# Altium footprint library WR-WTB_2.00mm.PcbLib: 70 footprints (part 4 of 5)
Each footprint in its own frame and in the unit in brackets; x right, y up, seen from the top. Pads: shape width x height; smd on the part's side, far side on the other; paste and mask are expansions set on the pad; w line width, h text height; cw(c..) or ccw(c..) is an arc to the next point about the centre after c.
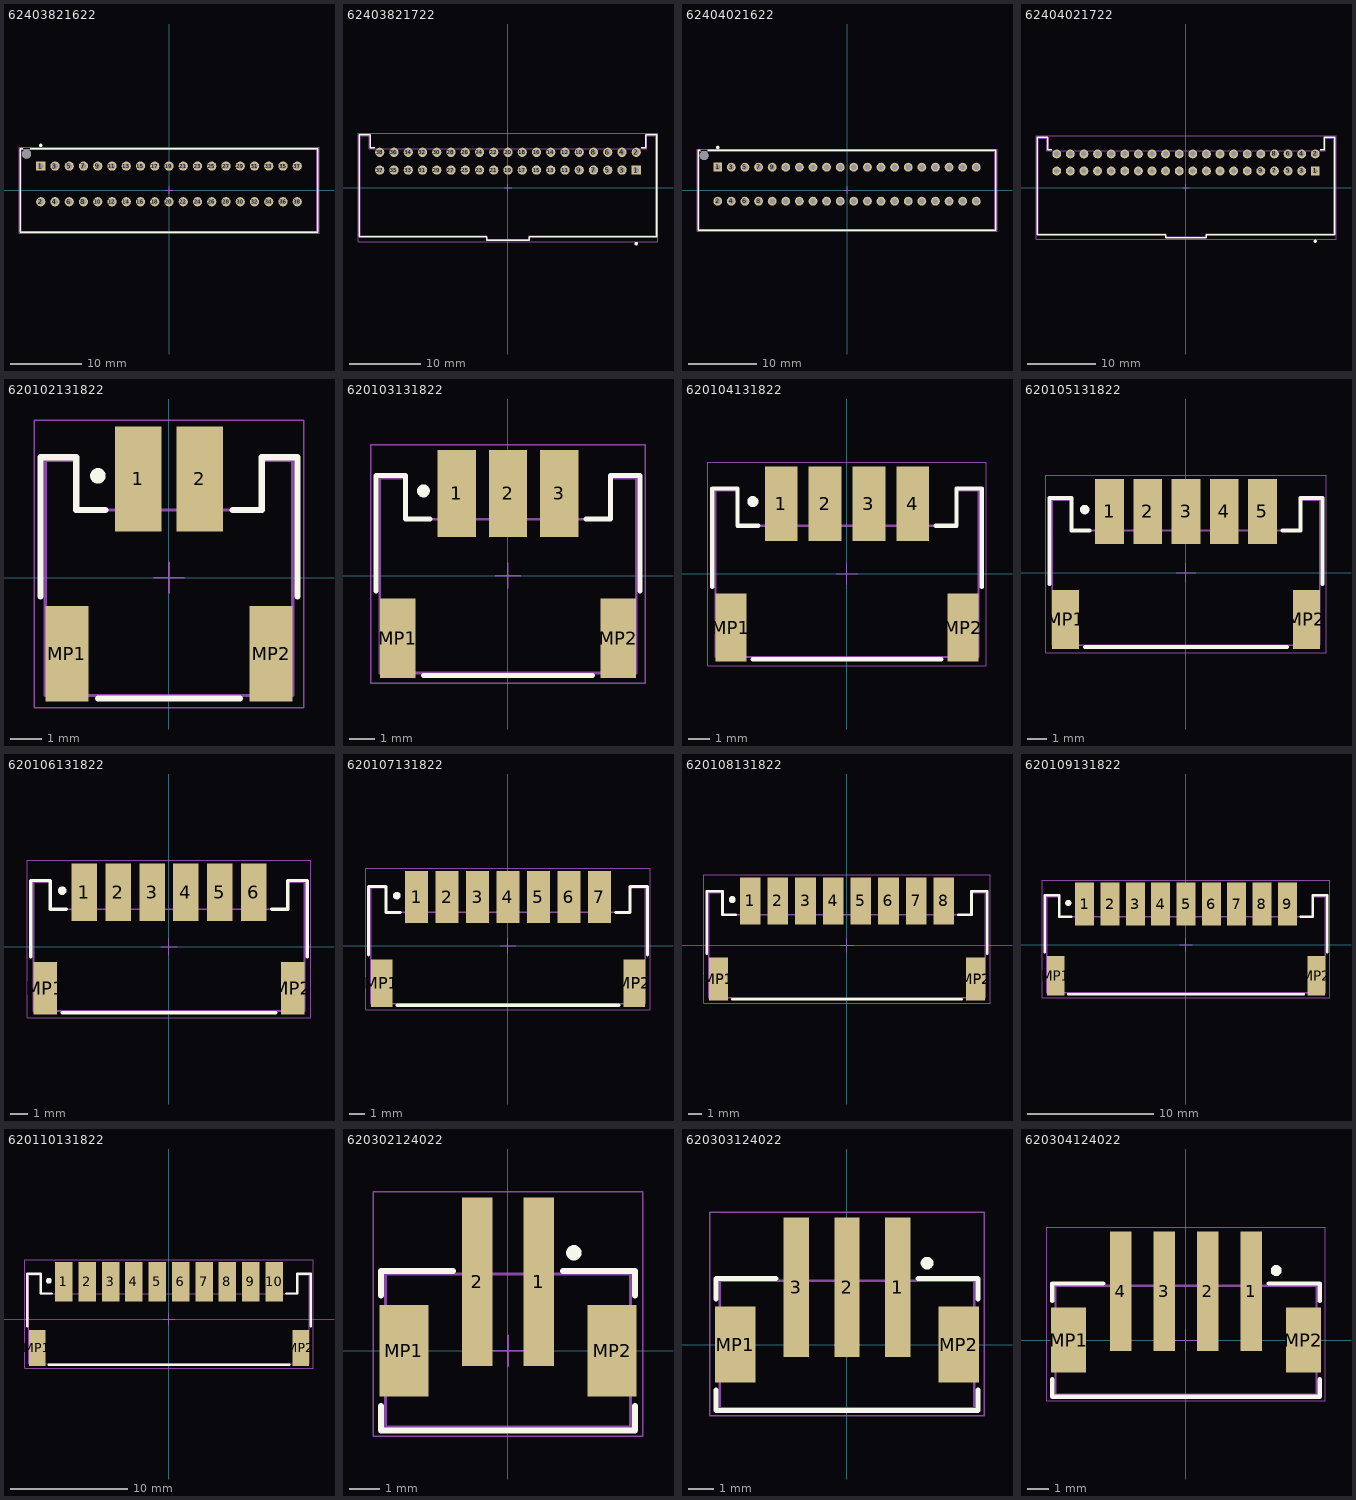
[diagram p3: the footprints below, top view; thin cyan lines are the x and y axes]

## 62403821622 [mm] "2.00mm Male Dual Row Vertical Shrouded Header with positive locking, 38p"
height 11.6
pads (39):
  rect 1.3x1.3 hole 0.8: 1(-18,3.4)
  round 1.3 hole 0.8: 2(-18,-1.6) 3(-16,3.4) 4(-16,-1.6) 5(-14,3.4) 6(-14,-1.6) 7(-12,3.4) 8(-12,-1.6) 9(-10,3.4) 10(-10,-1.6) 11(-8,3.4) 12(-8,-1.6) 13(-6,3.4) 14(-6,-1.6) 15(-4,3.4) 16(-4,-1.6) 17(-2,3.4) 18(-2,-1.6) 19(0,3.4) 20(0,-1.6) 21(2,3.4) 22(2,-1.6) 23(4,3.4) 24(4,-1.6) 25(6,3.4) 26(6,-1.6) 27(8,3.4) 28(8,-1.6) 29(10,3.4) 30(10,-1.6) 31(12,3.4) 32(12,-1.6) 33(14,3.4) 34(14,-1.6) 35(16,3.4) 36(16,-1.6) 37(18,3.4) 38(18,-1.6)
  round 1.3 hole 1.3 unplated: MH1(-20,5.1)
Top Overlay:
  circle w0.25: c-18,6.3 r0.125
  lines w0.2: -20.55,5.85 -20.85,5.85 -20.85,-5.85 20.85,-5.85 20.85,5.85 -19.45,5.85
Mechanical 13:
  lines w0.1: -20.7,-5.75 -20.7,5.75 ; -20.7,-5.75 20.7,-5.75 20.7,5.75 -20.7,5.75 ; -20.7,-5.75 -20.7,5.75
Mechanical 15:
  lines w0.05: -0.5,0 0.5,0 ; 0,-0.5 0,0.5 ; -21.05,-6.05 21.05,-6.05 21.05,6.05 -21.05,6.05 -21.05,-6.05
3D body "62403821622.stp": height 9.78, standoff -3.17, extent -20.7,-5.75 20.7,5.75

## 62403821722 [mm] "2.00mm Male Dual Row Horizontal Shrouded Header with positive locking, 38p"
height 11.7
pads (38):
  rect 1.3x1.3 hole 0.8: 1(18,2.45)
  round 1.3 hole 0.8: 2(18,4.95) 3(16,2.45) 4(16,4.95) 5(14,2.45) 6(14,4.95) 7(12,2.45) 8(12,4.95) 9(10,2.45) 10(10,4.95) 11(8,2.45) 12(8,4.95) 13(6,2.45) 14(6,4.95) 15(4,2.45) 16(4,4.95) 17(2,2.45) 18(2,4.95) 19(0,2.45) 20(0,4.95) 21(-2,2.45) 22(-2,4.95) 23(-4,2.45) 24(-4,4.95) 25(-6,2.45) 26(-6,4.95) 27(-8,2.45) 28(-8,4.95) 29(-10,2.45) 30(-10,4.95) 31(-12,2.45) 32(-12,4.95) 33(-14,2.45) 34(-14,4.95) 35(-16,2.45) 36(-16,4.95) 37(-18,2.45) 38(-18,4.95)
Top Overlay:
  circle w0.25: c18,-7.875 r0.125
  lines w0.2: -18.7,5.6 -19.35,5.6 -19.35,7.4 -20.85,7.4 -20.85,-6.9 -3,-6.9 -3,-7.4 3,-7.4 3,-6.9 20.85,-6.9 20.85,7.4 19.35,7.4 19.35,5.6 18.7,5.6
Mechanical 13:
  lines w0.1: -20.7,-6.75 -3,-6.75 -3,-7.25 3,-7.25 3,-6.75 20.7,-6.75 20.7,7.25 19.5,7.25 19.5,5.45 -19.5,5.45 -19.5,7.25 -20.7,7.25 -20.7,-6.75
Mechanical 15:
  lines w0.05: -0.5,0 0.5,0 ; 0,-0.5 0,0.5 ; -21.05,-7.6 21.05,-7.6 21.05,7.6 -21.05,7.6 -21.05,-7.6
3D body "62403821722.stp": height 11.73, standoff -3.17, extent -20.7,-7.25 20.7,7.25

## 62404021622 [mm] "2.00mm Male Dual Row Vertical Shrouded Header with positive locking, 40p"
height 11.6
pads (41):
  rect 1.3x1.3 hole 0.8: 1(-19,3.4)
  round 1.3 hole 0.8: 2(-19,-1.6) 3(-17,3.4) 4(-17,-1.6) 5(-15,3.4) 6(-15,-1.6) 7(-13,3.4) 8(-13,-1.6) 9(-11,3.4) 10(-11,-1.6) 11(-9,3.4) 12(-9,-1.6) 13(-7,3.4) 14(-7,-1.6) 15(-5,3.4) 16(-5,-1.6) 17(-3,3.4) 18(-3,-1.6) 19(-1,3.4) 20(-1,-1.6) 21(1,3.4) 22(1,-1.6) 23(3,3.4) 24(3,-1.6) 25(5,3.4) 26(5,-1.6) 27(7,3.4) 28(7,-1.6) 29(9,3.4) 30(9,-1.6) 31(11,3.4) 32(11,-1.6) 33(13,3.4) 34(13,-1.6) 35(15,3.4) 36(15,-1.6) 37(17,3.4) 38(17,-1.6) 39(19,3.4) 40(19,-1.6)
  round 1.3 hole 1.3 unplated: MH1(-21,5.1)
Top Overlay:
  circle w0.25: c-19,6.3 r0.125
  lines w0.2: -21.55,5.85 -21.85,5.85 -21.85,-5.85 21.85,-5.85 21.85,5.85 -20.45,5.85
Mechanical 13:
  lines w0.1: -21.7,-5.75 -21.7,5.75 ; -21.7,-5.75 21.7,-5.75 21.7,5.75 -21.7,5.75 ; -21.7,-5.75 -21.7,5.75
Mechanical 15:
  lines w0.05: -0.5,0 0.5,0 ; 0,-0.5 0,0.5 ; -22.05,-6.05 22.05,-6.05 22.05,6.05 -22.05,6.05 -22.05,-6.05
3D body "62404021622.stp": height 9.78, standoff -3.17, extent -21.7,-5.75 21.7,5.75

## 62404021722 [mm] "2.00mm Male Dual Row Horizontal Shrouded Header with positive locking, 40p"
height 11.7
pads (40):
  rect 1.3x1.3 hole 0.8: 1(19,2.45)
  round 1.3 hole 0.8: 2(19,4.95) 3(17,2.45) 4(17,4.95) 5(15,2.45) 6(15,4.95) 7(13,2.45) 8(13,4.95) 9(11,2.45) 10(11,4.95) 11(9,2.45) 12(9,4.95) 13(7,2.45) 14(7,4.95) 15(5,2.45) 16(5,4.95) 17(3,2.45) 18(3,4.95) 19(1,2.45) 20(1,4.95) 21(-1,2.45) 22(-1,4.95) 23(-3,2.45) 24(-3,4.95) 25(-5,2.45) 26(-5,4.95) 27(-7,2.45) 28(-7,4.95) 29(-9,2.45) 30(-9,4.95) 31(-11,2.45) 32(-11,4.95) 33(-13,2.45) 34(-13,4.95) 35(-15,2.45) 36(-15,4.95) 37(-17,2.45) 38(-17,4.95) 39(-19,2.45) 40(-19,4.95)
Top Overlay:
  circle w0.25: c19,-7.875 r0.125
  lines w0.2: -19.7,5.6 -20.35,5.6 -20.35,7.4 -21.85,7.4 -21.85,-6.9 -3,-6.9 -3,-7.4 3,-7.4 3,-6.9 21.85,-6.9 21.85,7.4 20.35,7.4 20.35,5.6 19.7,5.6
Mechanical 13:
  lines w0.1: -21.7,-6.75 -21.7,7.25 -20.5,7.25 -20.5,5.45 20.5,5.45 20.5,7.25 21.7,7.25 21.7,-6.75 3,-6.75 3,-7.25 -3,-7.25 -3,-6.75 -21.7,-6.75
Mechanical 15:
  lines w0.05: -0.5,0 0.5,0 ; 0,-0.5 0,0.5 ; -22.05,-7.6 -22.05,7.6 22.05,7.6 22.05,-7.6 -22.05,-7.6
3D body "62404021722.stp": height 11.73, standoff -3.17, extent -21.7,-7.25 21.7,7.25

## 620102131822 [mm] "2.00mm SMT Male Horizontal Shrouded Header, 2p"
height 5.6
pads (4):
  rect 1.5x3.4 smd: 1(-1,3.2) 2(1,3.2)
  rect 1.4x3.1 smd: MP1(-3.3,-2.45) MP2(3.3,-2.45)
Top Overlay:
  circle w0.25: c-2.3,3.3 r0.125
  lines w0.2: -4.15,-0.6 -4.15,3.9 -3,3.9 -3,2.2 -2.05,2.2 ; -2.3,-3.9 2.3,-3.9 ; 2.05,2.2 3,2.2 3,3.9 4.15,3.9 4.15,-0.6
Mechanical 13:
  lines w0.1: -4,-3.8 -4,3.8 -3,3.8 -3,2.2 3,2.2 3,3.8 4,3.8 4,-3.8 -4,-3.8
Mechanical 15:
  lines w0.05: -0.5,0 0.5,0 ; 0,-0.5 0,0.5 ; -4.35,-4.2 -4.35,5.1 4.35,5.1 4.35,-4.2 -4.35,-4.2
3D body "620102131822.stp": height 5.57, standoff -0.01, extent -4,-3.8 4,4.8

## 620103131822 [mm] "2.00mm SMT Male Horizontal Shrouded Header, 3p"
height 5.6
pads (5):
  rect 1.5x3.4 smd: 1(-2,3.2) 2(0,3.2) 3(2,3.2)
  rect 1.4x3.1 smd: MP1(-4.3,-2.45) MP2(4.3,-2.45)
Top Overlay:
  circle w0.25: c-3.3,3.3 r0.125
  lines w0.2: -5.15,-0.6 -5.15,3.9 -4,3.9 -4,2.2 -3.05,2.2 ; -3.3,-3.9 3.3,-3.9 ; 3.05,2.2 4,2.2 4,3.9 5.15,3.9 5.15,-0.6
Mechanical 13:
  lines w0.1: -5,-3.8 -5,3.8 -4,3.8 -4,2.2 4,2.2 4,3.8 5,3.8 5,-3.8 -5,-3.8
Mechanical 15:
  lines w0.05: -0.5,0 0.5,0 ; 0,-0.5 0,0.5 ; -5.35,-4.2 -5.35,5.1 5.35,5.1 5.35,-4.2 -5.35,-4.2
3D body "620103131822.stp": height 5.57, standoff -0.01, extent -5,-3.8 5,4.8

## 620104131822 [mm] "2.00mm SMT Male Horizontal Shrouded Header, 4p"
height 5.6
pads (6):
  rect 1.5x3.4 smd: 1(-3,3.2) 2(-1,3.2) 3(1,3.2) 4(3,3.2)
  rect 1.4x3.1 smd: MP1(-5.3,-2.45) MP2(5.3,-2.45)
Top Overlay:
  circle w0.25: c-4.3,3.3 r0.125
  lines w0.2: -6.15,-0.6 -6.15,3.9 -5,3.9 -5,2.2 -4.05,2.2 ; -4.3,-3.9 4.3,-3.9 ; 4.05,2.2 5,2.2 5,3.9 6.15,3.9 6.15,-0.6
Mechanical 13:
  lines w0.1: -6,-3.8 6,-3.8 6,3.8 5,3.8 5,2.2 -5,2.2 -5,3.8 -6,3.8 -6,-3.8
Mechanical 15:
  lines w0.05: -0.5,0 0.5,0 ; 0,-0.5 0,0.5 ; -6.35,-4.2 6.35,-4.2 6.35,5.1 -6.35,5.1 -6.35,-4.2
3D body "620104131822.stp": height 5.57, standoff -0.01, extent -6,-3.8 6,4.8

## 620105131822 [mm] "2.00mm SMT Male Horizontal Shrouded Header, 5p"
height 5.6
pads (7):
  rect 1.5x3.4 smd: 1(-4,3.2) 2(-2,3.2) 3(0,3.2) 4(2,3.2) 5(4,3.2)
  rect 1.4x3.1 smd: MP1(-6.3,-2.45) MP2(6.3,-2.45)
Top Overlay:
  circle w0.25: c-5.3,3.3 r0.125
  lines w0.2: -7.15,-0.6 -7.15,3.9 -6,3.9 -6,2.2 -5.05,2.2 ; -5.3,-3.9 5.3,-3.9 ; 5.05,2.2 6,2.2 6,3.9 7.15,3.9 7.15,-0.6
Mechanical 13:
  lines w0.1: -7,-3.8 7,-3.8 7,3.8 6,3.8 6,2.2 -6,2.2 -6,3.8 -7,3.8 -7,-3.8
Mechanical 15:
  lines w0.05: -0.5,0 0.5,0 ; 0,-0.5 0,0.5 ; -7.35,-4.2 7.35,-4.2 7.35,5.1 -7.35,5.1 -7.35,-4.2
3D body "620105131822.stp": height 5.57, standoff -0.01, extent -7,-3.8 7,4.8

## 620106131822 [mm] "2.00mm SMT Male Horizontal Shrouded Header, 6p"
height 5.6
pads (8):
  rect 1.5x3.4 smd: 1(-5,3.2) 2(-3,3.2) 3(-1,3.2) 4(1,3.2) 5(3,3.2) 6(5,3.2)
  rect 1.4x3.1 smd: MP1(-7.3,-2.45) MP2(7.3,-2.45)
Top Overlay:
  circle w0.25: c-6.3,3.3 r0.125
  lines w0.2: -8.15,-0.6 -8.15,3.9 -7,3.9 -7,2.2 -6.05,2.2 ; -6.3,-3.9 6.3,-3.9 ; 6.05,2.2 7,2.2 7,3.9 8.15,3.9 8.15,-0.6
Mechanical 13:
  lines w0.1: -8,-3.8 -8,3.8 -7,3.8 -7,2.2 7,2.2 7,3.8 8,3.8 8,-3.8 -8,-3.8
Mechanical 15:
  lines w0.05: -0.5,0 0.5,0 ; 0,-0.5 0,0.5 ; -8.35,-4.2 -8.35,5.1 8.35,5.1 8.35,-4.2 -8.35,-4.2
3D body "620106131822.stp": height 5.57, standoff -0.01, extent -8,-3.8 8,4.8

## 620107131822 [mm] "2.00mm SMT Male Horizontal Shrouded Header, 7p"
height 5.6
pads (9):
  rect 1.5x3.4 smd: 1(-6,3.2) 2(-4,3.2) 3(-2,3.2) 4(0,3.2) 5(2,3.2) 6(4,3.2) 7(6,3.2)
  rect 1.4x3.1 smd: MP1(-8.3,-2.45) MP2(8.3,-2.45)
Top Overlay:
  circle w0.25: c-7.3,3.3 r0.125
  lines w0.2: -9.15,-0.6 -9.15,3.9 -8,3.9 -8,2.2 -7.05,2.2 ; -7.3,-3.9 7.3,-3.9 ; 7.05,2.2 8,2.2 8,3.9 9.15,3.9 9.15,-0.6
Mechanical 13:
  lines w0.1: -9,-3.8 9,-3.8 9,3.8 8,3.8 8,2.2 -8,2.2 -8,3.8 -9,3.8 -9,-3.8
Mechanical 15:
  lines w0.05: -0.5,0 0.5,0 ; 0,-0.5 0,0.5 ; -9.35,-4.2 9.35,-4.2 9.35,5.1 -9.35,5.1 -9.35,-4.2
3D body "620107131822.stp": height 5.57, standoff -0.01, extent -9,-3.8 9,4.8

## 620108131822 [mm] "2.00mm SMT Male Horizontal Shrouded Header, 8p"
height 5.6
pads (10):
  rect 1.5x3.4 smd: 1(-7,3.2) 2(-5,3.2) 3(-3,3.2) 4(-1,3.2) 5(1,3.2) 6(3,3.2) 7(5,3.2) 8(7,3.2)
  rect 1.4x3.1 smd: MP1(-9.3,-2.45) MP2(9.3,-2.45)
Top Overlay:
  circle w0.25: c-8.3,3.3 r0.125
  lines w0.2: -10.15,-0.6 -10.15,3.9 -9,3.9 -9,2.2 -8.05,2.2 ; -8.3,-3.9 8.3,-3.9 ; 8.05,2.2 9,2.2 9,3.9 10.15,3.9 10.15,-0.6
Mechanical 13:
  lines w0.1: -10,-3.8 10,-3.8 10,3.8 9,3.8 9,2.2 -9,2.2 -9,3.8 -10,3.8 -10,-3.8
Mechanical 15:
  lines w0.05: -0.5,0 0.5,0 ; 0,-0.5 0,0.5 ; -10.35,-4.2 10.35,-4.2 10.35,5.1 -10.35,5.1 -10.35,-4.2
3D body "620108131822.stp": height 5.57, standoff -0.01, extent -10,-3.8 10,4.8

## 620109131822 [mm] "2.00mm SMT Male Horizontal Shrouded Header, 9p"
height 5.6
pads (11):
  rect 1.5x3.4 smd: 1(-8,3.2) 2(-6,3.2) 3(-4,3.2) 4(-2,3.2) 5(0,3.2) 6(2,3.2) 7(4,3.2) 8(6,3.2) 9(8,3.2)
  rect 1.4x3.1 smd: MP1(-10.3,-2.45) MP2(10.3,-2.45)
Top Overlay:
  circle w0.25: c-9.3,3.3 r0.125
  lines w0.2: -11.15,-0.6 -11.15,3.9 -10,3.9 -10,2.2 -9.05,2.2 ; -9.3,-3.9 9.3,-3.9 ; 9.05,2.2 10,2.2 10,3.9 11.15,3.9 11.15,-0.6
Mechanical 13:
  lines w0.1: -11,-3.8 11,-3.8 11,3.8 10,3.8 10,2.2 -10,2.2 -10,3.8 -11,3.8 -11,-3.8
Mechanical 15:
  lines w0.05: -0.5,0 0.5,0 ; 0,-0.5 0,0.5 ; -11.35,-4.2 11.35,-4.2 11.35,5.1 -11.35,5.1 -11.35,-4.2
3D body "620109131822.stp": height 5.57, standoff -0.01, extent -11,-3.8 11,4.8

## 620110131822 [mm] "2.00mm SMT Male Horizontal Shrouded Header, 10p"
height 5.6
pads (12):
  rect 1.5x3.4 smd: 1(-9,3.2) 2(-7,3.2) 3(-5,3.2) 4(-3,3.2) 5(-1,3.2) 6(1,3.2) 7(3,3.2) 8(5,3.2) 9(7,3.2) 10(9,3.2)
  rect 1.4x3.1 smd: MP1(-11.3,-2.45) MP2(11.3,-2.45)
Top Overlay:
  circle w0.25: c-10.3,3.3 r0.125
  lines w0.2: -12.15,-0.6 -12.15,3.9 -11,3.9 -11,2.2 -10.05,2.2 ; -10.3,-3.9 10.3,-3.9 ; 10.05,2.2 11,2.2 11,3.9 12.15,3.9 12.15,-0.6
Mechanical 13:
  lines w0.1: -12,-3.8 -12,3.8 -11,3.8 -11,2.2 11,2.2 11,3.8 12,3.8 12,-3.8 -12,-3.8
Mechanical 15:
  lines w0.05: -0.5,0 0.5,0 ; 0,-0.5 0,0.5 ; -12.35,-4.2 -12.35,5.1 12.35,5.1 12.35,-4.2 -12.35,-4.2
3D body "620110131822.stp": height 5.57, standoff -0.01, extent -12,-3.8 12,4.8

## 620302124022 [mm] "2.00mm SMT Male Vertical Shrouded Header, 2p"
height 6.86
pads (4):
  rect 1x5.5 smd: 1(1,2.25) 2(-1,2.25)
  rect 1.6x3 smd: MP1(-3.4,0) MP2(3.4,0)
Top Overlay:
  circle w0.25: c2.15,3.2 r0.125
  lines w0.2: -4.15,-1.8 -4.15,-2.6 4.15,-2.6 4.15,-1.8 ; -4.15,1.8 -4.15,2.6 -1.8,2.6 ; 1.8,2.6 4.15,2.6 4.15,1.8
Mechanical 13:
  lines w0.1: -4,-2.5 -4,2.5 4,2.5 4,-2.5 -4,-2.5
Mechanical 15:
  lines w0.05: -0.5,0 0.5,0 ; 0,-0.5 0,0.5 ; -4.4,-2.8 4.4,-2.8 4.4,5.2 -4.4,5.2 -4.4,-2.8
3D body "620302124022.stp": height 6.77, standoff -0.01, extent -4,-2.5 4,4.51

## 620303124022 [mm] "2.00mm SMT Male Vertical Shrouded Header, 3p"
height 6.86
pads (5):
  rect 1x5.5 smd: 1(2,2.25) 2(0,2.25) 3(-2,2.25)
  rect 1.6x3 smd: MP1(-4.4,0) MP2(4.4,0)
Top Overlay:
  circle w0.25: c3.15,3.2 r0.125
  lines w0.2: -5.15,-1.8 -5.15,-2.6 5.15,-2.6 5.15,-1.8 ; -5.15,1.8 -5.15,2.6 -2.8,2.6 ; 2.8,2.6 5.15,2.6 5.15,1.8
Mechanical 13:
  lines w0.1: -5,-2.5 5,-2.5 5,2.5 -5,2.5 -5,-2.5
Mechanical 15:
  lines w0.05: -0.5,0 0.5,0 ; 0,-0.5 0,0.5 ; -5.4,-2.8 -5.4,5.2 5.4,5.2 5.4,-2.8 -5.4,-2.8
3D body "620303124022.stp": height 6.77, standoff -0.01, extent -5,-2.5 5,4.51

## 620304124022 [mm] "2.00mm SMT Male Vertical Shrouded Header, 4p"
height 6.86
pads (6):
  rect 1x5.5 smd: 1(3,2.25) 2(1,2.25) 3(-1,2.25) 4(-3,2.25)
  rect 1.6x3 smd: MP1(-5.4,0) MP2(5.4,0)
Top Overlay:
  circle w0.25: c4.15,3.2 r0.125
  lines w0.2: -6.15,-1.8 -6.15,-2.6 6.15,-2.6 6.15,-1.8 ; -6.15,1.8 -6.15,2.6 -3.8,2.6 ; 3.8,2.6 6.15,2.6 6.15,1.8
Mechanical 13:
  lines w0.1: 6,-2.5 6,2.5 -6,2.5 -6,-2.5 6,-2.5
Mechanical 15:
  lines w0.05: -0.5,0 0.5,0 ; 0,-0.5 0,0.5 ; -6.4,-2.8 -6.4,5.2 6.4,5.2 6.4,-2.8 -6.4,-2.8
3D body "620304124022.stp": height 6.77, standoff -0.01, extent -6,-2.5 6,4.51